# Altium footprint library 47352-1001.PcbLib: 1 footprints
Each footprint in its own frame and in the unit in brackets; x right, y up, seen from the top. Pads: shape width x height; smd on the part's side, far side on the other; paste and mask are expansions set on the pad; w line width, h text height; cw(c..) or ccw(c..) is an arc to the next point about the centre after c.
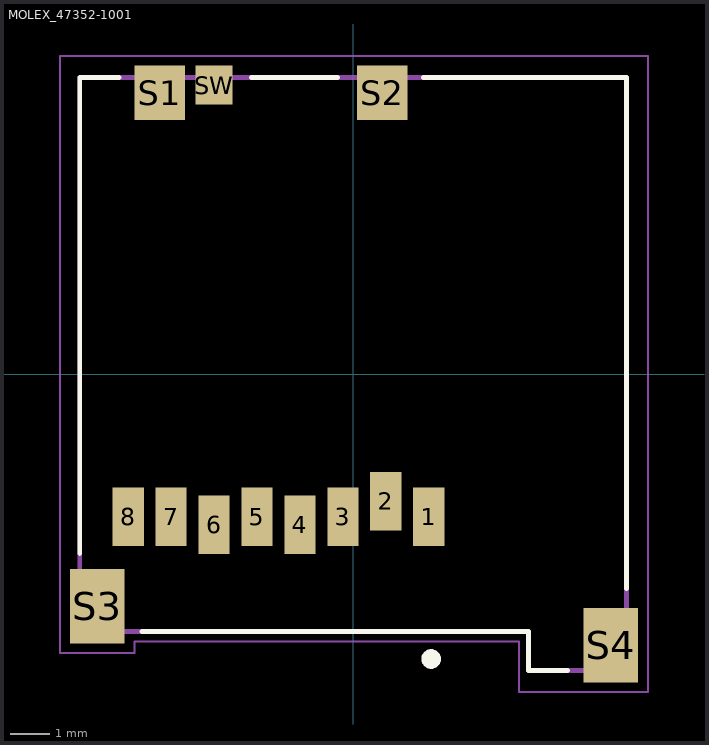
[diagram p0: the footprint, top view; thin cyan lines are the x and y axes]

## MOLEX_47352-1001 [mm]
pads (13):
  rect 0.8x1.5 smd: 1(1.94,-3.66) 2(0.84,-3.26) 3(-0.26,-3.66) 4(-1.36,-3.86) 5(-2.46,-3.66) 6(-3.56,-3.86) 7(-4.66,-3.66) 8(-5.76,-3.66)
  rect 1.3x1.4 smd: S1(-4.95,7.2) S2(0.75,7.2)
  rect 1.4x1.9 smd: S3(-6.55,-5.95) S4(6.6,-6.95)
  rect 0.95x1 smd: SW(-3.56,7.4)
Top Overlay:
  circle w0.3: c2,-7.3 r0.1
  lines w0.127: -7,-4.6 -7,7.6 -6,7.6 ; -5.4,-6.6 4.5,-6.6 4.5,-7.6 5.5,-7.6 ; -2.6,7.6 -0.4,7.6 ; 1.8,7.6 7,7.6 7,-5.5
Mechanical 13:
  circle w0.3: c2,-3.7 r0.1
  lines w0.127: -7,-6.6 -7,7.6 7,7.6 7,-7.6 4.5,-7.6 4.5,-6.6 -7,-6.6
Mechanical 15:
  lines w0.05: -7.5,-7.15 -7.5,8.15 7.55,8.15 7.55,-8.15 4.25,-8.15 4.25,-6.85 -5.6,-6.85 -5.6,-7.15 -7.5,-7.15